# Altium schematic symbol library SCH - INDUCTANCES - SMD - SER2918H333KL.Schlib: 1 symbol
Pins are listed as number, name and electrical type; pins without a type are passive.

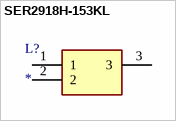
[diagram p0: symbol SER2918H-153KL]

## SER2918H-153KL
designator L?
Inductor
pins: 1, 2, 3